# Altium schematic symbol library MP1605GTF-Z.SchLib: 1 symbol
Pins are listed as number, name and electrical type; pins without a type are passive.

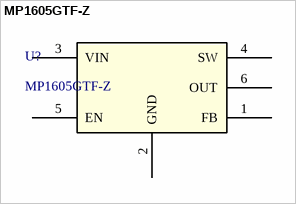
[diagram p0: symbol MP1605GTF-Z]

## MP1605GTF-Z
designator U?
2A 5.5V 2.2MHz Synchronous Step-Down Converter with Low11&micro;A Quiescent Current in SOT563 Package; Manufacturer_Name: Monolithic Power Systems; Copyright: Copyright (C) 2025 Ultra Librarian. All rights reserved.; Manufacturer_Part_Number: MP1605GTF-Z; RefDes: RefDes; Type: Type
footprint SOT563_MP1605_MNP
pins: 1 FB, 2 GND (power), 3 VIN (power), 4 SW, 5 EN, 6 OUT (power)